# Altium footprint library 2.10-LQFP封装.PcbLib: 97 footprints (part 1 of 7)
Each footprint in its own frame and in the unit in brackets; x right, y up, seen from the top. Pads: shape width x height; smd on the part's side, far side on the other; paste and mask are expansions set on the pad; w line width, h text height; cw(c..) or ccw(c..) is an arc to the next point about the centre after c.
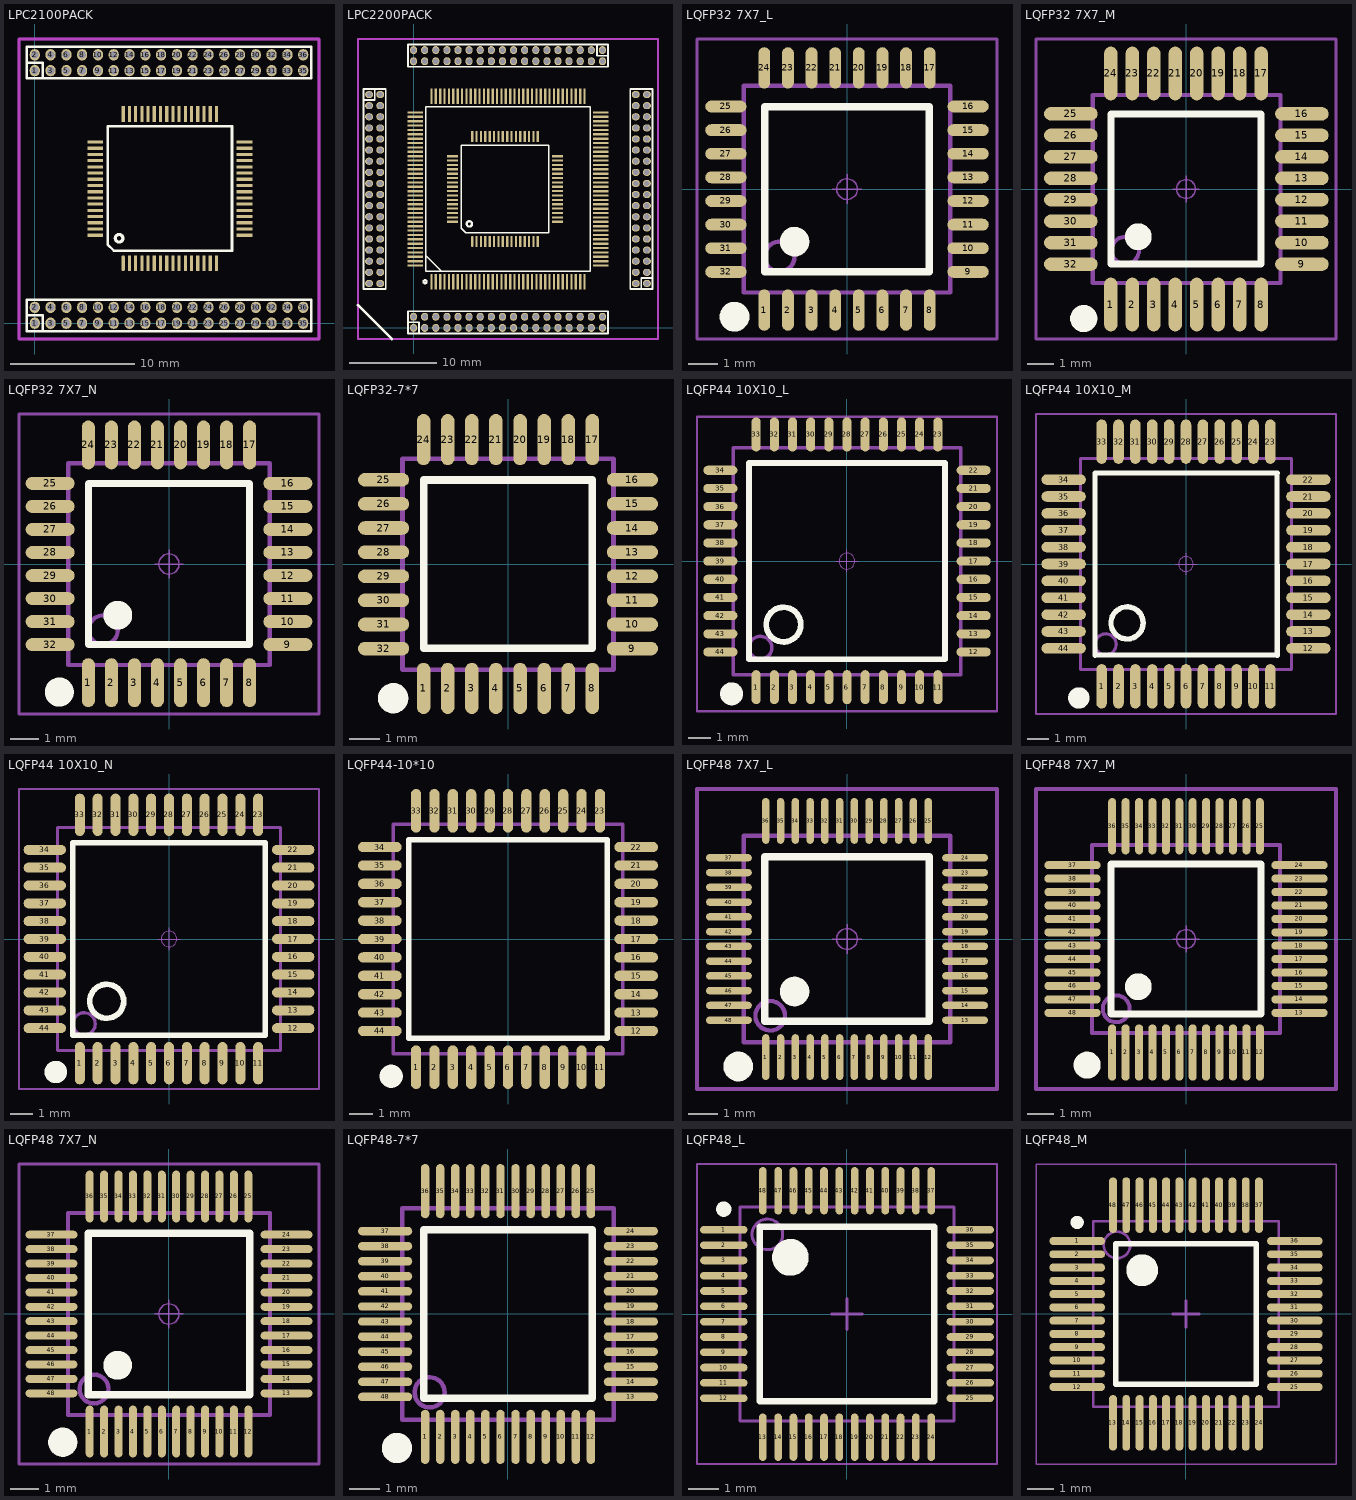
[diagram p0: the footprints below, top view; thin cyan lines are the x and y axes]

## LPC2100PACK [mil]
pads (136):
  oval 32x36 hole 24: 1(0,0) 1(0,800) 2(0,50) 2(0,850) 3(50,0) 3(50,800) 4(50,50) 4(50,850) 5(100,0) 5(100,800) 6(100,50) 6(100,850) 7(150,0) 7(150,800) 8(150,50) 8(150,850) 9(200,0) 9(200,800) 10(200,50) 10(200,850) 11(250,0) 11(250,800) 12(250,50) 12(250,850) 13(300,0) 13(300,800) 14(300,50) 14(300,850) 15(350,0) 15(350,800) 16(350,50) 16(350,850) 17(400,0) 17(400,800) 18(400,50) 18(400,850) 19(450,0) 19(450,800) 20(450,50) 20(450,850) 21(500,0) 21(500,800) 22(500,50) 22(500,850) 23(550,0) 23(550,800) 24(550,50) 24(550,850) 25(600,0) 25(600,800) 26(600,50) 26(600,850) 27(650,0) 27(650,800) 28(650,50) 28(650,850) 29(700,0) 29(700,800) 30(700,50) 30(700,850) 31(750,0) 31(750,800) 32(750,50) 32(750,850) 33(800,0) 33(800,800) 34(800,50) 34(800,850) 35(850,0) 35(850,800) 36(850,50) 36(850,850)
  oval 10x50 smd: 1(280,190)
  rect 10x50 smd: 2(299.69,190) 3(319.37,190) 4(339.06,190) 5(358.74,190) 6(378.43,190) 7(398.11,190) 8(417.8,190) 9(437.48,190) 10(457.17,190) 11(476.85,190) 12(496.54,190) 13(516.22,190) 14(535.91,190) 15(555.59,190) 16(575.28,190) 33(575.28,662.44) 34(555.59,662.44) 35(535.91,662.44) 36(516.22,662.44) 37(496.54,662.44) 38(476.85,662.44) 39(457.17,662.44) 40(437.48,662.44) 41(417.8,662.44) 42(398.11,662.44) 43(378.43,662.44) 44(358.74,662.44) 45(339.06,662.44) 46(319.37,662.44) 47(299.69,662.44) 48(280,662.44)
  rect 50x10 smd: 17(663.86,278.58) 18(663.86,298.27) 19(663.86,317.95) 20(663.86,337.64) 21(663.86,357.32) 22(663.86,377.01) 23(663.86,396.69) 24(663.86,416.38) 25(663.86,436.06) 26(663.86,455.75) 27(663.86,475.43) 28(663.86,495.12) 29(663.86,514.8) 30(663.86,534.49) 31(663.86,554.17) 32(663.86,573.86) 49(191.42,573.86) 50(191.42,554.17) 51(191.42,534.49) 52(191.42,514.8) 53(191.42,495.12) 54(191.42,475.43) 55(191.42,455.75) 56(191.42,436.06) 57(191.42,416.38) 58(191.42,396.69) 59(191.42,377.01) 60(191.42,357.32) 61(191.42,337.64) 62(191.42,317.95) 63(191.42,298.27) 64(191.42,278.58)
Top Overlay:
  circle w10: c267,268.96 r12.04
  lines w8: -25,25 25,25 25,-25 ; -25,825 25,825 25,775 ; -25,-25 875,-25 875,75 -25,75 -25,-25 ; -25,775 875,775 875,875 -25,875 -25,775 ; 230.79,249.05 250.47,229.37 624.49,229.37 624.49,623.07 230.79,623.07 230.79,249.05
Keep-Out Layer:
  lines w8: -50,-50 900,-50 900,900 -50,900 -50,-50
Mechanical 1:
  lines w8: -50,-50 900,-50 900,900 -50,900 -50,-50

## LPC2200PACK [mil]
pads (352):
  oval 36x32 hole 24: 1(-200,1050) 1(1050,200) 2(-150,1050) 2(1000,200) 3(-200,1000) 3(1050,250) 4(-150,1000) 4(1000,250) 5(-200,950) 5(1050,300) 6(-150,950) 6(1000,300) 7(-200,900) 7(1050,350) 8(-150,900) 8(1000,350) 9(-200,850) 9(1050,400) 10(-150,850) 10(1000,400) 11(-200,800) 11(1050,450) 12(-150,800) 12(1000,450) 13(-200,750) 13(1050,500) 14(-150,750) 14(1000,500) 15(-200,700) 15(1050,550) 16(-150,700) 16(1000,550) 17(-200,650) 17(1050,600) 18(-150,650) 18(1000,600) 19(-200,600) 19(1050,650) 20(-150,600) 20(1000,650) 21(-200,550) 21(1050,700) 22(-150,550) 22(1000,700) 23(-200,500) 23(1050,750) 24(-150,500) 24(1000,750) 25(-200,450) 25(1050,800) 26(-150,450) 26(1000,800) 27(-200,400) 27(1050,850) 28(-150,400) 28(1000,850) 29(-200,350) 29(1050,900) 30(-150,350) 30(1000,900) 31(-200,300) 31(1050,950) 32(-150,300) 32(1000,950) 33(-200,250) 33(1050,1000) 34(-150,250) 34(1000,1000) 35(-200,200) 35(1050,1050) 36(-150,200) 36(1000,1050)
  oval 32x36 hole 24: 1(0,0) 1(850,1250) 2(0,50) 2(850,1200) 3(50,0) 3(800,1250) 4(50,50) 4(800,1200) 5(100,0) 5(750,1250) 6(100,50) 6(750,1200) 7(150,0) 7(700,1250) 8(150,50) 8(700,1200) 9(200,0) 9(650,1250) 10(200,50) 10(650,1200) 11(250,0) 11(600,1250) 12(250,50) 12(600,1200) 13(300,0) 13(550,1250) 14(300,50) 14(550,1200) 15(350,0) 15(500,1250) 16(350,50) 16(500,1200) 17(400,0) 17(450,1250) 18(400,50) 18(450,1200) 19(400,1250) 19(450,0) 20(400,1200) 20(450,50) 21(350,1250) 21(500,0) 22(350,1200) 22(500,50) 23(300,1250) 23(550,0) 24(300,1200) 24(550,50) 25(250,1250) 25(600,0) 26(250,1200) 26(600,50) 27(200,1250) 27(650,0) 28(200,1200) 28(650,50) 29(150,1250) 29(700,0) 30(150,1200) 30(700,50) 31(100,1250) 31(750,0) 32(100,1200) 32(750,50) 33(50,1250) 33(800,0) 34(50,1200) 34(800,50) 35(0,1250) 35(850,0) 36(0,1200) 36(850,50)
  rect 10x70 smd: 1(80.6,207.59) 2(100.28,207.59) 3(119.97,207.59) 4(139.65,207.59) 5(159.34,207.59) 6(179.02,207.59) 7(198.71,207.59) 8(218.39,207.59) 9(238.08,207.59) 10(257.76,207.59) 11(277.45,207.59) 12(297.13,207.59) 13(316.82,207.59) 14(336.5,207.59) 15(356.19,207.59) 16(375.87,207.59) 17(395.56,207.59) 18(415.24,207.59) 19(434.93,207.59) 20(454.61,207.59) 21(474.3,207.59) 22(493.98,207.59) 23(513.67,207.59) 24(533.35,207.59) 25(553.04,207.59) 26(572.72,207.59) 27(592.41,207.59) 28(612.09,207.59) 29(631.78,207.59) 30(651.46,207.59) 31(671.15,207.59) 32(690.83,207.59) 33(710.52,207.59) 34(730.2,207.59) 35(749.89,207.59) 36(769.57,207.59) 73(769.57,1042.24) 74(749.89,1042.24) 75(730.2,1042.24) 76(710.52,1042.24) 77(690.83,1042.24) 78(671.15,1042.24) 79(651.46,1042.24) 80(631.78,1042.24) 81(612.09,1042.24) 82(592.41,1042.24) 83(572.72,1042.24) 84(553.04,1042.24) 85(533.35,1042.24) 86(513.67,1042.24) 87(493.98,1042.24) 88(474.3,1042.24) 89(454.61,1042.24) 90(434.93,1042.24) 91(415.24,1042.24) 92(395.56,1042.24) 93(375.87,1042.24) 94(356.19,1042.24) 95(336.5,1042.24) 96(316.82,1042.24) 97(297.13,1042.24) 98(277.45,1042.24) 99(257.76,1042.24) 100(238.08,1042.24) 101(218.39,1042.24) 102(198.71,1042.24) 103(179.02,1042.24) 104(159.34,1042.24) 105(139.65,1042.24) 106(119.97,1042.24) 107(100.28,1042.24) 108(80.6,1042.24)
  oval 10x50 smd: 1(264,389)
  rect 10x50 smd: 2(283.69,389) 3(303.37,389) 4(323.06,389) 5(342.74,389) 6(362.43,389) 7(382.11,389) 8(401.8,389) 9(421.48,389) 10(441.17,389) 11(460.85,389) 12(480.54,389) 13(500.22,389) 14(519.91,389) 15(539.59,389) 16(559.28,389) 33(559.28,861.44) 34(539.59,861.44) 35(519.91,861.44) 36(500.22,861.44) 37(480.54,861.44) 38(460.85,861.44) 39(441.17,861.44) 40(421.48,861.44) 41(401.8,861.44) 42(382.11,861.44) 43(362.43,861.44) 44(342.74,861.44) 45(323.06,861.44) 46(303.37,861.44) 47(283.69,861.44) 48(264,861.44)
  rect 50x10 smd: 17(647.86,477.58) 18(647.86,497.27) 19(647.86,516.95) 20(647.86,536.64) 21(647.86,556.32) 22(647.86,576.01) 23(647.86,595.69) 24(647.86,615.38) 25(647.86,635.06) 26(647.86,654.75) 27(647.86,674.43) 28(647.86,694.12) 29(647.86,713.8) 30(647.86,733.49) 31(647.86,753.17) 32(647.86,772.86) 49(175.42,772.86) 50(175.42,753.17) 51(175.42,733.49) 52(175.42,713.8) 53(175.42,694.12) 54(175.42,674.43) 55(175.42,654.75) 56(175.42,635.06) 57(175.42,615.38) 58(175.42,595.69) 59(175.42,576.01) 60(175.42,556.32) 61(175.42,536.64) 62(175.42,516.95) 63(175.42,497.27) 64(175.42,477.58)
  rect 70x10 smd: 37(842.41,280.43) 38(842.41,300.11) 39(842.41,319.8) 40(842.41,339.48) 41(842.41,359.17) 42(842.41,378.85) 43(842.41,398.54) 44(842.41,418.22) 45(842.41,437.91) 46(842.41,457.59) 47(842.41,477.28) 48(842.41,496.96) 49(842.41,516.65) 50(842.41,536.33) 51(842.41,556.02) 52(842.41,575.7) 53(842.41,595.39) 54(842.41,615.07) 55(842.41,634.76) 56(842.41,654.44) 57(842.41,674.13) 58(842.41,693.81) 59(842.41,713.5) 60(842.41,733.18) 61(842.41,752.87) 62(842.41,772.55) 63(842.41,792.24) 64(842.41,811.92) 65(842.41,831.61) 66(842.41,851.29) 67(842.41,870.98) 68(842.41,890.66) 69(842.41,910.35) 70(842.41,930.03) 71(842.41,949.72) 72(842.41,969.4) 109(7.76,969.4) 110(7.76,949.72) 111(7.76,930.03) 112(7.76,910.35) 113(7.76,890.66) 114(7.76,870.98) 115(7.76,851.29) 116(7.76,831.61) 117(7.76,811.92) 118(7.76,792.24) 119(7.76,772.55) 120(7.76,752.87) 121(7.76,733.18) 122(7.76,713.5) 123(7.76,693.81) 124(7.76,674.13) 125(7.76,654.44) 126(7.76,634.76) 127(7.76,615.07) 128(7.76,595.39) 129(7.76,575.7) 130(7.76,556.02) 131(7.76,536.33) 132(7.76,516.65) 133(7.76,496.96) 134(7.76,477.28) 135(7.76,457.59) 136(7.76,437.91) 137(7.76,418.22) 138(7.76,398.54) 139(7.76,378.85) 140(7.76,359.17) 141(7.76,339.48) 142(7.76,319.8) 143(7.76,300.11) 144(7.76,280.43)
Top Overlay:
  circle w9.84: c51.6,207.57 r7.02
  circle w10: c251,467.96 r12.04
  lines w7.8: 55.01,325.59 125.6,255
  lines w7.87: 55.01,254.84 55.01,994.99 795.16,994.99 795.16,254.84 55.01,254.84
  lines w8: -225,1025 -175,1025 -175,1075 ; -25,25 25,25 25,-25 ; 825,1275 825,1225 875,1225 ; 1025,175 1025,225 1075,225 ; -225,175 -125,175 -125,1075 -225,1075 -225,175 ; -25,-25 875,-25 875,75 -25,75 -25,-25 ; -25,1175 -25,1275 875,1275 875,1175 -25,1175 ; 214.79,448.05 234.47,428.37 608.49,428.37 608.49,822.07 214.79,822.07 214.79,448.05 ; 975,175 975,1075 1075,1075 1075,175 975,175
  lines w12: -250,102 -98,-50
Keep-Out Layer:
  lines w10: -250,-50 1100,-50 1100,1300 -250,1300 -250,-50
Mechanical 1:
  lines w10: -250,-50 -250,1300 1100,1300 1100,-50 -250,-50

## LQFP32 7X7_L [mm] "32脚，体宽7x7mm，脚距0.8mm     淘宝ID:黄晶宝石"
pads (32):
  oval 0.4x1.4 smd: 1(-2.8,-4.096) 2(-2,-4.096) 3(-1.2,-4.096) 4(-0.4,-4.096) 5(0.4,-4.096) 6(1.2,-4.096) 7(2,-4.096) 8(2.8,-4.096) 17(2.8,4.108) 18(2,4.108) 19(1.2,4.108) 20(0.4,4.108) 21(-0.4,4.108) 22(-1.2,4.108) 23(-2,4.108) 24(-2.8,4.108)
  oval 1.4x0.4 smd: 9(4.102,-2.8) 10(4.102,-2) 11(4.102,-1.2) 12(4.102,-0.4) 13(4.102,0.4) 14(4.102,1.2) 15(4.102,2) 16(4.102,2.8) 25(-4.102,2.8) 26(-4.102,2) 27(-4.102,1.2) 28(-4.102,0.4) 29(-4.102,-0.4) 30(-4.102,-1.2) 31(-4.102,-2) 32(-4.102,-2.8)
Top Overlay:
  circle w0.508: c-3.81,-4.318 r0.25
  circle w0.5: c-1.778,-1.778 r0.25
  lines w0.254: -2.794,-2.794 -2.794,2.794 2.794,2.794 2.794,-2.794 -2.794,-2.794
Mechanical 13:
  circle w0.15: c-2.286,-2.286 r0.508
  lines w0.15: -3.5,-3.5 3.5,-3.5 3.5,3.5 -3.5,3.5 -3.5,-3.5
Mechanical 15:
  circle w0.05: c0,0 r0.35
  lines w0.05: -0.5,0 0.5,0 ; 0,-0.5 0,0.5
  lines w0.1: -5.08,-5.074 5.08,-5.074 5.08,5.086 -5.08,5.086 -5.08,-5.074
3D body "LQFP32-7x7.STEP": height 1.45, standoff 0, extent -4.503,-4.503 4.503,4.503

## LQFP32 7X7_M [mm] "32脚，体宽7x7mm，脚距0.8mm     淘宝ID:黄晶宝石"
pads (32):
  oval 0.5x2 smd: 1(-2.8,-4.303) 2(-2,-4.303) 3(-1.2,-4.303) 4(-0.4,-4.303) 5(0.4,-4.303) 6(1.2,-4.303) 7(2,-4.303) 8(2.8,-4.303) 17(2.8,4.303) 18(2,4.303) 19(1.2,4.303) 20(0.4,4.303) 21(-0.4,4.303) 22(-1.2,4.303) 23(-2,4.303) 24(-2.8,4.303)
  oval 2x0.5 smd: 9(4.317,-2.8) 10(4.317,-2) 11(4.317,-1.2) 12(4.317,-0.4) 13(4.317,0.4) 14(4.317,1.2) 15(4.317,2) 16(4.317,2.8) 25(-4.289,2.8) 26(-4.289,2) 27(-4.289,1.2) 28(-4.289,0.4) 29(-4.289,-0.4) 30(-4.289,-1.2) 31(-4.289,-2) 32(-4.289,-2.8)
Top Overlay:
  circle w0.5: c-1.778,-1.778 r0.25
  circle w0.508: c-3.81,-4.826 r0.25
  lines w0.254: -2.794,-2.794 2.794,-2.794 2.794,2.794 -2.794,2.794 -2.794,-2.794
Mechanical 13:
  circle w0.15: c-2.26,-2.286 r0.508
  lines w0.15: -3.474,-3.5 3.526,-3.5 3.526,3.5 -3.474,3.5 -3.474,-3.5
Mechanical 15:
  circle w0.05: c0,0 r0.35
  lines w0.05: -0.5,0 0.5,0 ; 0,-0.5 0,0.5
  lines w0.1: -5.588,-5.588 5.588,-5.588 5.588,5.588 -5.588,5.588 -5.588,-5.588
3D body "LQFP32-7x7.STEP": height 1.45, standoff 0, extent -4.503,-4.503 4.503,4.503

## LQFP32 7X7_N [mm] "32脚，体宽7x7mm，脚距0.8mm      淘宝ID:黄晶宝石"
pads (32):
  oval 0.45x1.7 smd: 1(-2.8,-4.12) 2(-2,-4.12) 3(-1.2,-4.12) 4(-0.4,-4.12) 5(0.4,-4.12) 6(1.2,-4.12) 7(2,-4.12) 8(2.8,-4.12) 17(2.8,4.132) 18(2,4.132) 19(1.2,4.132) 20(0.4,4.132) 21(-0.4,4.132) 22(-1.2,4.132) 23(-2,4.132) 24(-2.8,4.132)
  oval 1.7x0.45 smd: 9(4.126,-2.8) 10(4.126,-2) 11(4.126,-1.2) 12(4.126,-0.4) 13(4.126,0.4) 14(4.126,1.2) 15(4.126,2) 16(4.126,2.8) 25(-4.126,2.8) 26(-4.126,2) 27(-4.126,1.2) 28(-4.126,0.4) 29(-4.126,-0.4) 30(-4.126,-1.2) 31(-4.126,-2) 32(-4.126,-2.8)
Top Overlay:
  circle w0.5: c-1.778,-1.778 r0.25
  circle w0.508: c-3.81,-4.445 r0.25
  lines w0.254: -2.794,-2.794 2.794,-2.794 2.794,2.794 -2.794,2.794 -2.794,-2.794
Mechanical 13:
  circle w0.15: c-2.286,-2.292 r0.508
  lines w0.15: -3.5,-3.506 -3.5,3.494 3.5,3.494 3.5,-3.506 -3.5,-3.506
Mechanical 15:
  circle w0.05: c0,0 r0.35
  lines w0.05: -0.5,0 0.5,0 ; 0,-0.5 0,0.5
  lines w0.1: -5.207,-5.207 -5.207,5.207 5.207,5.207 5.207,-5.207 -5.207,-5.207
3D body "LQFP32-7x7.STEP": height 1.45, standoff 0, extent -4.503,-4.503 4.503,4.503

## LQFP32-7*7 [mm] "7mmx7mm，间距0.8mm 封装库来自淘宝卖家 ID：黄晶宝石"
pads (32):
  oval 0.45x1.7 smd: 1(-2.8,-4.12) 2(-2,-4.12) 3(-1.2,-4.12) 4(-0.4,-4.12) 5(0.4,-4.12) 6(1.2,-4.12) 7(2,-4.12) 8(2.8,-4.12) 17(2.8,4.132) 18(2,4.132) 19(1.2,4.132) 20(0.4,4.132) 21(-0.4,4.132) 22(-1.2,4.132) 23(-2,4.132) 24(-2.8,4.132)
  oval 1.7x0.45 smd: 9(4.126,-2.8) 10(4.126,-2) 11(4.126,-1.2) 12(4.126,-0.4) 13(4.126,0.4) 14(4.126,1.2) 15(4.126,2) 16(4.126,2.8) 25(-4.126,2.8) 26(-4.126,2) 27(-4.126,1.2) 28(-4.126,0.4) 29(-4.126,-0.4) 30(-4.126,-1.2) 31(-4.126,-2) 32(-4.126,-2.8)
Top Overlay:
  circle w0.508: c-3.81,-4.445 r0.25
  lines w0.254: -2.794,-2.794 2.794,-2.794 2.794,2.794 -2.794,2.794 -2.794,-2.794
Mechanical 13:
  lines w0.15: -3.5,-3.506 -3.5,3.494 3.5,3.494 3.5,-3.506 -3.5,-3.506
3D body "LQFP32-7x7.STEP": height 1.45, standoff 0, extent -4.503,-4.503 4.503,4.503

## LQFP44 10X10_L [mm] "44脚，体宽10x10mm，脚距0.8mm      淘宝ID:黄晶宝石"
pads (44):
  oval 0.4x1.5 smd: 1(-4,-5.551) 2(-3.2,-5.551) 3(-2.4,-5.551) 4(-1.6,-5.551) 5(-0.8,-5.551) 6(0,-5.551) 7(0.8,-5.551) 8(1.6,-5.551) 9(2.4,-5.551) 10(3.2,-5.551) 11(4,-5.551) 23(4,5.578) 24(3.2,5.578) 25(2.4,5.578) 26(1.6,5.578) 27(0.8,5.578) 28(0,5.578) 29(-0.8,5.578) 30(-1.6,5.578) 31(-2.4,5.578) 32(-3.2,5.578) 33(-4,5.578)
  oval 1.5x0.4 smd: 12(5.575,-4) 13(5.575,-3.2) 14(5.575,-2.4) 15(5.575,-1.6) 16(5.575,-0.8) 17(5.575,0) 18(5.575,0.8) 19(5.575,1.6) 20(5.575,2.4) 21(5.575,3.2) 22(5.575,4) 34(-5.575,4) 35(-5.575,3.2) 36(-5.575,2.4) 37(-5.575,1.6) 38(-5.575,0.8) 39(-5.575,0) 40(-5.575,-0.8) 41(-5.575,-1.6) 42(-5.575,-2.4) 43(-5.575,-3.2) 44(-5.575,-4)
Top Overlay:
  circle w0.508: c-5.08,-5.842 r0.25
  circle w0.254: c-2.794,-2.794 r0.762
  lines w0.254: -4.318,-4.318 4.318,-4.318 4.318,4.318 -4.318,4.318 -4.318,-4.318
Mechanical 13:
  circle w0.15: c-3.81,-3.81 r0.5
  lines w0.15: -5,-5 5,-5 5,5 -5,5 -5,-5
Mechanical 15:
  circle w0.05: c0,0 r0.35
  lines w0.05: -0.5,0 0.5,0 ; 0,-0.5 0,0.5
  lines w0.1: -6.604,-6.604 -6.604,6.35 6.604,6.35 6.604,-6.604 -6.604,-6.604
3D body "LQFP44-10x10.STEP": height 1.45, standoff 0, extent -6.003,-6.003 6.003,6.003

## LQFP44 10X10_M [mm] "44脚，体宽10x10mm，脚距0.8mm"
pads (44):
  oval 0.5x2.1 smd: 1(-4,-5.8) 2(-3.2,-5.8) 3(-2.4,-5.8) 4(-1.6,-5.8) 5(-0.8,-5.8) 6(0,-5.8) 7(0.8,-5.8) 8(1.6,-5.8) 9(2.4,-5.8) 10(3.2,-5.8) 11(4,-5.8) 23(4,5.8) 24(3.2,5.8) 25(2.4,5.8) 26(1.6,5.8) 27(0.8,5.8) 28(0,5.8) 29(-0.8,5.8) 30(-1.6,5.8) 31(-2.4,5.8) 32(-3.2,5.8) 33(-4,5.8)
  oval 2.1x0.5 smd: 12(5.8,-4) 13(5.8,-3.2) 14(5.8,-2.4) 15(5.8,-1.6) 16(5.8,-0.8) 17(5.8,0) 18(5.8,0.8) 19(5.8,1.6) 20(5.8,2.4) 21(5.8,3.2) 22(5.8,4) 34(-5.8,4) 35(-5.8,3.2) 36(-5.8,2.4) 37(-5.8,1.6) 38(-5.8,0.8) 39(-5.8,0) 40(-5.8,-0.8) 41(-5.8,-1.6) 42(-5.8,-2.4) 43(-5.8,-3.2) 44(-5.8,-4)
Top Overlay:
  circle w0.254: c-2.794,-2.794 r0.762
  circle w0.508: c-5.08,-6.35 r0.25
  lines w0.254: -4.318,-4.318 4.318,-4.318 4.318,4.318 -4.318,4.318 -4.318,-4.318
Mechanical 13:
  circle w0.15: c-3.81,-3.81 r0.5
  lines w0.15: -5,-5 5,-5 5,5 -5,5 -5,-5
Mechanical 15:
  circle w0.05: c0,0 r0.35
  lines w0.05: -0.5,0 0.5,0 ; 0,-0.5 0,0.5
  lines w0.1: -7.112,-7.112 7.112,-7.112 7.112,7.112 -7.112,7.112 -7.112,-7.112
3D body "LQFP44-10x10.STEP": height 1.45, standoff 0, extent -6.003,-6.003 6.003,6.003

## LQFP44 10X10_N [mm] "44脚，体宽10x10mm，脚距0.8mm       淘宝ID:黄晶宝石"
pads (44):
  oval 0.45x1.9 smd: 1(-4,-5.575) 2(-3.2,-5.575) 3(-2.4,-5.575) 4(-1.6,-5.575) 5(-0.8,-5.575) 6(0,-5.575) 7(0.8,-5.575) 8(1.6,-5.575) 9(2.4,-5.575) 10(3.2,-5.575) 11(4,-5.575) 23(4,5.575) 24(3.2,5.575) 25(2.4,5.575) 26(1.6,5.575) 27(0.8,5.575) 28(0,5.575) 29(-0.8,5.575) 30(-1.6,5.575) 31(-2.4,5.575) 32(-3.2,5.575) 33(-4,5.575)
  oval 1.9x0.45 smd: 12(5.575,-4) 13(5.575,-3.2) 14(5.575,-2.4) 15(5.575,-1.6) 16(5.575,-0.8) 17(5.575,0) 18(5.575,0.8) 19(5.575,1.6) 20(5.575,2.4) 21(5.575,3.2) 22(5.575,4) 34(-5.575,4) 35(-5.575,3.2) 36(-5.575,2.4) 37(-5.575,1.6) 38(-5.575,0.8) 39(-5.575,0) 40(-5.575,-0.8) 41(-5.575,-1.6) 42(-5.575,-2.4) 43(-5.575,-3.2) 44(-5.575,-4)
Top Overlay:
  circle w0.508: c-5.08,-5.969 r0.25
  circle w0.254: c-2.794,-2.794 r0.762
  lines w0.254: -4.318,-4.318 4.318,-4.318 4.318,4.318 -4.318,4.318 -4.318,-4.318
Mechanical 13:
  circle w0.15: c-3.81,-3.81 r0.5
  lines w0.15: -5,-5 -5,5 5,5 5,-5 -5,-5
Mechanical 15:
  circle w0.05: c0,0 r0.35
  lines w0.05: -0.5,0 0.5,0 ; 0,-0.5 0,0.5
  lines w0.1: -6.731,-6.731 -6.731,6.731 6.731,6.731 6.731,-6.731 -6.731,-6.731
3D body "LQFP44-10x10.STEP": height 1.45, standoff 0, extent -6.003,-6.003 6.003,6.003

## LQFP44-10*10 [mm] "10x10mm，0.8mm       淘宝ID:黄晶宝石"
pads (44):
  oval 0.45x1.9 smd: 1(-4,-5.575) 2(-3.2,-5.575) 3(-2.4,-5.575) 4(-1.6,-5.575) 5(-0.8,-5.575) 6(0,-5.575) 7(0.8,-5.575) 8(1.6,-5.575) 9(2.4,-5.575) 10(3.2,-5.575) 11(4,-5.575) 23(4,5.575) 24(3.2,5.575) 25(2.4,5.575) 26(1.6,5.575) 27(0.8,5.575) 28(0,5.575) 29(-0.8,5.575) 30(-1.6,5.575) 31(-2.4,5.575) 32(-3.2,5.575) 33(-4,5.575)
  oval 1.9x0.45 smd: 12(5.575,-4) 13(5.575,-3.2) 14(5.575,-2.4) 15(5.575,-1.6) 16(5.575,-0.8) 17(5.575,0) 18(5.575,0.8) 19(5.575,1.6) 20(5.575,2.4) 21(5.575,3.2) 22(5.575,4) 34(-5.575,4) 35(-5.575,3.2) 36(-5.575,2.4) 37(-5.575,1.6) 38(-5.575,0.8) 39(-5.575,0) 40(-5.575,-0.8) 41(-5.575,-1.6) 42(-5.575,-2.4) 43(-5.575,-3.2) 44(-5.575,-4)
Top Overlay:
  circle w0.508: c-5.08,-5.969 r0.25
  lines w0.254: -4.318,-4.318 -4.318,4.318 4.318,4.318 4.318,-4.318 -4.318,-4.318
Mechanical 13:
  lines w0.15: -5,-5 5,-5 5,5 -5,5 -5,-5
3D body "LQFP44-10x10.STEP": height 1.45, standoff 0, extent -5.969,-6.003 6.037,6.003

## LQFP48 7X7_L [mm] "48脚，体宽7x7mm，脚距0.5mm     淘宝ID:黄晶宝石"
height 1.6
pads (48):
  oval 0.25x1.55 smd: 1(-2.75,-4) 2(-2.25,-4) 3(-1.75,-4) 4(-1.25,-4) 5(-0.75,-4) 6(-0.25,-4) 7(0.25,-4) 8(0.75,-4) 9(1.25,-4) 10(1.75,-4) 11(2.25,-4) 12(2.75,-4) 25(2.75,4) 26(2.25,4) 27(1.75,4) 28(1.25,4) 29(0.75,4) 30(0.25,4) 31(-0.25,4) 32(-0.75,4) 33(-1.25,4) 34(-1.75,4) 35(-2.25,4) 36(-2.75,4)
  oval 1.55x0.25 smd: 13(4,-2.75) 14(4,-2.25) 15(4,-1.75) 16(4,-1.25) 17(4,-0.75) 18(4,-0.25) 19(4,0.25) 20(4,0.75) 21(4,1.25) 22(4,1.75) 23(4,2.25) 24(4,2.75) 37(-4,2.75) 38(-4,2.25) 39(-4,1.75) 40(-4,1.25) 41(-4,0.75) 42(-4,0.25) 43(-4,-0.25) 44(-4,-0.75) 45(-4,-1.25) 46(-4,-1.75) 47(-4,-2.25) 48(-4,-2.75)
Top Overlay:
  circle w0.508: c-3.683,-4.318 r0.25
  circle w0.5: c-1.778,-1.778 r0.25
  lines w0.254: -2.794,-2.794 -2.794,2.794 2.794,2.794 2.794,-2.794 -2.794,-2.794
Mechanical 13:
  circle w0.15: c-2.6,-2.6 r0.5
  lines w0.15: -3.5,-3.5 -3.5,3.5 3.5,3.5 3.5,-3.5 -3.5,-3.5
Mechanical 15:
  circle w0.05: c0,0 r0.35
  lines w0.05: -0.5,0 0.5,0 ; 0,-0.5 0,0.5
  lines w0.15: -5.08,-5.08 -5.08,5.08 5.08,5.08 5.08,-5.08 -5.08,-5.08
3D body "LQFP48-7x7.STEP": height 1.45, standoff 0, extent -4.503,-4.503 4.503,4.503

## LQFP48 7X7_M [mm] "48脚，体宽7x7mm，脚距0.5mm      淘宝ID:黄晶宝石"
height 1.6
pads (48):
  oval 0.3x2.1 smd: 1(-2.75,-4.227) 2(-2.25,-4.227) 3(-1.75,-4.227) 4(-1.25,-4.227) 5(-0.75,-4.227) 6(-0.25,-4.227) 7(0.25,-4.227) 8(0.75,-4.227) 9(1.25,-4.227) 10(1.75,-4.227) 11(2.25,-4.227) 12(2.75,-4.227) 25(2.75,4.202) 26(2.25,4.202) 27(1.75,4.202) 28(1.25,4.202) 29(0.75,4.202) 30(0.25,4.202) 31(-0.25,4.202) 32(-0.75,4.202) 33(-1.25,4.202) 34(-1.75,4.202) 35(-2.25,4.202) 36(-2.75,4.202)
  oval 2.1x0.3 smd: 13(4.227,-2.75) 14(4.227,-2.25) 15(4.227,-1.75) 16(4.227,-1.25) 17(4.227,-0.75) 18(4.227,-0.25) 19(4.227,0.25) 20(4.227,0.75) 21(4.227,1.25) 22(4.227,1.75) 23(4.227,2.25) 24(4.227,2.75) 37(-4.227,2.75) 38(-4.227,2.25) 39(-4.227,1.75) 40(-4.227,1.25) 41(-4.227,0.75) 42(-4.227,0.25) 43(-4.227,-0.25) 44(-4.227,-0.75) 45(-4.227,-1.25) 46(-4.227,-1.75) 47(-4.227,-2.25) 48(-4.227,-2.75)
Top Overlay:
  circle w0.508: c-3.683,-4.699 r0.25
  circle w0.5: c-1.778,-1.778 r0.25
  lines w0.254: -2.794,-2.794 -2.794,2.794 2.794,2.794 2.794,-2.794 -2.794,-2.794
Mechanical 13:
  circle w0.15: c-2.6,-2.6 r0.5
  lines w0.15: -3.5,-3.5 3.5,-3.5 3.5,3.5 -3.5,3.5 -3.5,-3.5
Mechanical 15:
  circle w0.05: c0,0 r0.35
  lines w0.05: -0.5,0 0.5,0 ; 0,-0.5 0,0.5
  lines w0.15: -5.588,-5.588 5.588,-5.588 5.588,5.588 -5.588,5.588 -5.588,-5.588
3D body "LQFP48-7x7.STEP": height 1.45, standoff 0, extent -4.503,-4.503 4.503,4.503

## LQFP48 7X7_N [mm] "48脚，体宽7x7mm，脚距0.5mm"
height 1.6
pads (48):
  oval 0.279x1.8 smd: 1(-2.75,-4.075) 2(-2.25,-4.075) 3(-1.75,-4.075) 4(-1.25,-4.075) 5(-0.75,-4.075) 6(-0.25,-4.075) 7(0.25,-4.075) 8(0.75,-4.075) 9(1.25,-4.075) 10(1.75,-4.075) 11(2.25,-4.075) 12(2.75,-4.075) 25(2.75,4.075) 26(2.25,4.075) 27(1.75,4.075) 28(1.25,4.075) 29(0.75,4.075) 30(0.25,4.075) 31(-0.25,4.075) 32(-0.75,4.075) 33(-1.25,4.075) 34(-1.75,4.075) 35(-2.25,4.075) 36(-2.75,4.075)
  oval 1.8x0.279 smd: 13(4.075,-2.75) 14(4.075,-2.25) 15(4.075,-1.75) 16(4.075,-1.25) 17(4.075,-0.75) 18(4.075,-0.25) 19(4.075,0.25) 20(4.075,0.75) 21(4.075,1.25) 22(4.075,1.75) 23(4.075,2.25) 24(4.075,2.75) 37(-4.075,2.75) 38(-4.075,2.25) 39(-4.075,1.75) 40(-4.075,1.25) 41(-4.075,0.75) 42(-4.075,0.25) 43(-4.075,-0.25) 44(-4.075,-0.75) 45(-4.075,-1.25) 46(-4.075,-1.75) 47(-4.075,-2.25) 48(-4.075,-2.75)
Top Overlay:
  circle w0.508: c-3.683,-4.445 r0.25
  circle w0.5: c-1.778,-1.778 r0.25
  lines w0.254: -2.794,-2.794 -2.794,2.794 2.794,2.794 2.794,-2.794 -2.794,-2.794
Mechanical 13:
  circle w0.15: c-2.6,-2.6 r0.5
  lines w0.15: -3.5,-3.5 3.5,-3.5 3.5,3.5 -3.5,3.5 -3.5,-3.5
Mechanical 15:
  circle w0.05: c0,0 r0.35
  lines w0.05: -0.5,0 0.5,0 ; 0,-0.5 0,0.5
  lines w0.1: -5.2,-5.2 -5.2,5.2 5.2,5.2 5.2,-5.2 -5.2,-5.2
3D body "LQFP48-7x7.STEP": height 1.45, standoff 0, extent -4.503,-4.503 4.503,4.503

## LQFP48-7*7 [mm] "7x7mm，0.5mm        淘宝ID:黄晶宝石"
height 1.6
pads (48):
  oval 0.279x1.8 smd: 1(-2.75,-4.075) 2(-2.25,-4.075) 3(-1.75,-4.075) 4(-1.25,-4.075) 5(-0.75,-4.075) 6(-0.25,-4.075) 7(0.25,-4.075) 8(0.75,-4.075) 9(1.25,-4.075) 10(1.75,-4.075) 11(2.25,-4.075) 12(2.75,-4.075) 25(2.75,4.075) 26(2.25,4.075) 27(1.75,4.075) 28(1.25,4.075) 29(0.75,4.075) 30(0.25,4.075) 31(-0.25,4.075) 32(-0.75,4.075) 33(-1.25,4.075) 34(-1.75,4.075) 35(-2.25,4.075) 36(-2.75,4.075)
  oval 1.8x0.279 smd: 13(4.075,-2.75) 14(4.075,-2.25) 15(4.075,-1.75) 16(4.075,-1.25) 17(4.075,-0.75) 18(4.075,-0.25) 19(4.075,0.25) 20(4.075,0.75) 21(4.075,1.25) 22(4.075,1.75) 23(4.075,2.25) 24(4.075,2.75) 37(-4.075,2.75) 38(-4.075,2.25) 39(-4.075,1.75) 40(-4.075,1.25) 41(-4.075,0.75) 42(-4.075,0.25) 43(-4.075,-0.25) 44(-4.075,-0.75) 45(-4.075,-1.25) 46(-4.075,-1.75) 47(-4.075,-2.25) 48(-4.075,-2.75)
Top Overlay:
  circle w0.508: c-3.683,-4.445 r0.25
  lines w0.254: -2.794,-2.794 -2.794,2.794 2.794,2.794 2.794,-2.794 -2.794,-2.794
Mechanical 13:
  circle w0.15: c-2.6,-2.6 r0.5
  lines w0.15: -3.5,-3.5 3.5,-3.5 3.5,3.5 -3.5,3.5 -3.5,-3.5
3D body "LQFP48-7x7.STEP": height 1.45, standoff 0, extent -4.503,-4.503 4.503,4.503

## LQFP48_L [mm] "封装库来自淘宝 ID：黄晶宝石 Thin QFP, 48-Leads, Body 7x7mm, Pitch 0.5mm, IPC High Density"
height 1.6
pads (48):
  oval 1.55x0.25 smd: 1(-4.025,2.75) 2(-4.025,2.25) 3(-4.025,1.75) 4(-4.025,1.25) 5(-4.025,0.75) 6(-4.025,0.25) 7(-4.025,-0.25) 8(-4.025,-0.75) 9(-4.025,-1.25) 10(-4.025,-1.75) 11(-4.025,-2.25) 12(-4.025,-2.75) 25(4.025,-2.75) 26(4.025,-2.25) 27(4.025,-1.75) 28(4.025,-1.25) 29(4.025,-0.75) 30(4.025,-0.25) 31(4.025,0.25) 32(4.025,0.75) 33(4.025,1.25) 34(4.025,1.75) 35(4.025,2.25) 36(4.025,2.75)
  oval 0.25x1.55 smd: 13(-2.75,-4.025) 14(-2.25,-4.025) 15(-1.75,-4.025) 16(-1.25,-4.025) 17(-0.75,-4.025) 18(-0.25,-4.025) 19(0.25,-4.025) 20(0.75,-4.025) 21(1.25,-4.025) 22(1.75,-4.025) 23(2.25,-4.025) 24(2.75,-4.025) 37(2.75,4.025) 38(2.25,4.025) 39(1.75,4.025) 40(1.25,4.025) 41(0.75,4.025) 42(0.25,4.025) 43(-0.25,4.025) 44(-0.75,4.025) 45(-1.25,4.025) 46(-1.75,4.025) 47(-2.25,4.025) 48(-2.75,4.025)
Top Overlay:
  circle w0.6: c-1.85,1.85 r0.3
  circle w0.25: c-4.025,3.425 r0.125
  lines w0.2: -2.85,-2.85 2.85,-2.85 2.85,2.85 -2.85,2.85 -2.85,-2.85
Mechanical 13:
  circle w0.1: c-2.6,2.6 r0.5
  lines w0.1: -3.5,-3.5 3.5,-3.5 3.5,3.5 -3.5,3.5 -3.5,-3.5
Mechanical 15:
  lines w0.05: -4.9,-4.9 4.9,-4.9 4.9,4.9 -4.9,4.9 -4.9,-4.9
  lines w0.1: -0.5,0 0.5,0 ; 0,-0.5 0,0.5
3D body "LQFP48-7x7.STEP": height 1.45, standoff 0, extent -4.503,-4.503 4.503,4.503

## LQFP48_M [mm] "封装库来自淘宝 ID：黄晶宝石 Thin QFP, 48-Leads, Body 7x7mm, Pitch 0.5mm, IPC Low Density"
height 1.6
pads (48):
  oval 2.1x0.3 smd: 1(-4.1,2.75) 2(-4.1,2.25) 3(-4.1,1.75) 4(-4.1,1.25) 5(-4.1,0.75) 6(-4.1,0.25) 7(-4.1,-0.25) 8(-4.1,-0.75) 9(-4.1,-1.25) 10(-4.1,-1.75) 11(-4.1,-2.25) 12(-4.1,-2.75) 25(4.1,-2.75) 26(4.1,-2.25) 27(4.1,-1.75) 28(4.1,-1.25) 29(4.1,-0.75) 30(4.1,-0.25) 31(4.1,0.25) 32(4.1,0.75) 33(4.1,1.25) 34(4.1,1.75) 35(4.1,2.25) 36(4.1,2.75)
  oval 0.3x2.1 smd: 13(-2.75,-4.1) 14(-2.25,-4.1) 15(-1.75,-4.1) 16(-1.25,-4.1) 17(-0.75,-4.1) 18(-0.25,-4.1) 19(0.25,-4.1) 20(0.75,-4.1) 21(1.25,-4.1) 22(1.75,-4.1) 23(2.25,-4.1) 24(2.75,-4.1) 37(2.75,4.1) 38(2.25,4.1) 39(1.75,4.1) 40(1.25,4.1) 41(0.75,4.1) 42(0.25,4.1) 43(-0.25,4.1) 44(-0.75,4.1) 45(-1.25,4.1) 46(-1.75,4.1) 47(-2.25,4.1) 48(-2.75,4.1)
Top Overlay:
  circle w0.6: c-1.65,1.65 r0.3
  circle w0.25: c-4.1,3.45 r0.125
  lines w0.2: -2.65,-2.65 2.65,-2.65 2.65,2.65 -2.65,2.65 -2.65,-2.65
Mechanical 13:
  circle w0.1: c-2.6,2.6 r0.5
  lines w0.1: -3.5,-3.5 3.5,-3.5 3.5,3.5 -3.5,3.5 -3.5,-3.5
Mechanical 15:
  lines w0.05: -5.65,-5.65 5.65,-5.65 5.65,5.65 -5.65,5.65 -5.65,-5.65
  lines w0.1: -0.5,0 0.5,0 ; 0,-0.5 0,0.5
3D body "LQFP48-7x7.STEP": height 1.45, standoff 0, extent -4.503,-4.503 4.503,4.503